# Altium schematic symbol library MAX16054AZT+T.SchLib: 1 symbol
Pins are listed as number, name and electrical type; pins without a type are passive.

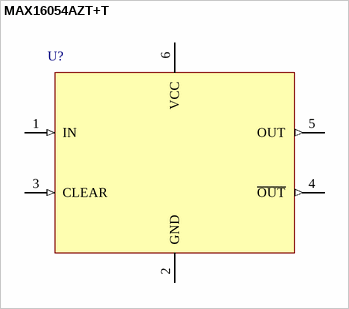
[diagram p0: symbol MAX16054AZT+T]

## MAX16054AZT+T
designator U?
Pushbutton on/off controller with debounce and latched output, 2.7-5.5V, TSOT23-6
pins: 1 IN (in), 2 GND (power), 3 CLEAR (in), 4 ~{OUT} (out), 5 OUT (out), 6 VCC (power)